# Altium schematic symbol library ILS_TETRA_LIB_S.SchLib: 4 symbols
Pins are listed as number, name and electrical type; pins without a type are passive.

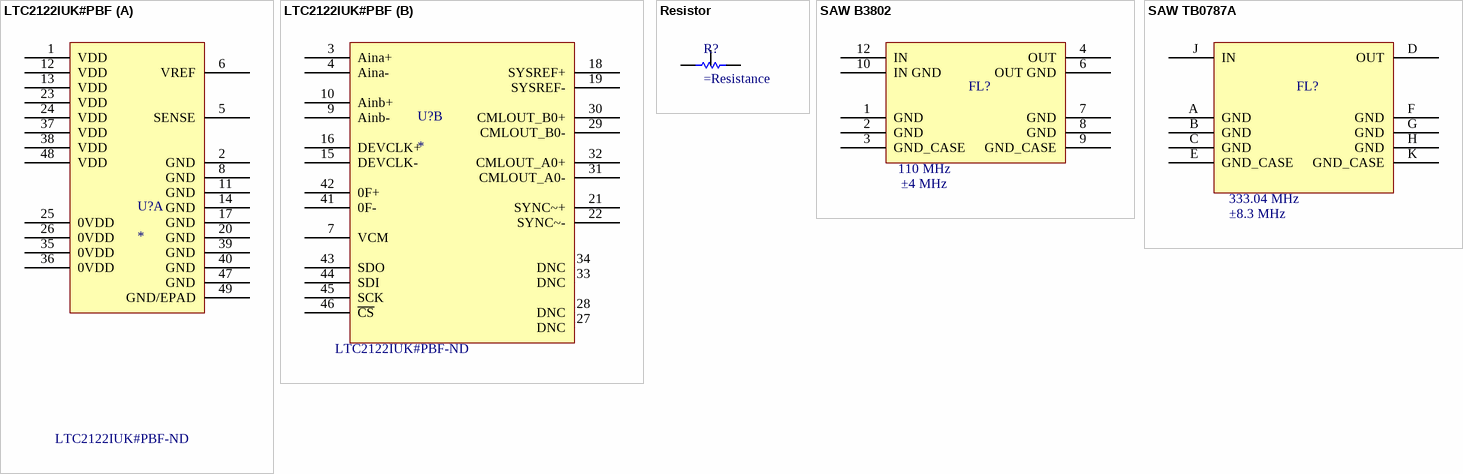
[diagram p0: symbols LTC2122IUK#PBF to SAW TB0787A]

## LTC2122IUK#PBF
designator U?  Supplier Part Number 1: LTC2122IUK#PBF-ND
IC ADC 14BIT 170MSPS 48QFN; Manufacturer: Analog Devices / Linear Technology; Manufacturer Part Number: LTC2122IUK#PBF; Number of Bits: 14; Sampling Rate: 170000000S/s; Number of Inputs: 2; Min Supply Voltage: 1.7V; Max Supply Voltage: 1.9V; Interface: SPI; Resolution: 14b; Supplier 1: Digi-Key; RoHS: Yes; Category: Analog to Digital Converters (ADCs); Stock 1: 52; Pricing 1: 1=105,29000, 25=102,14040 (USD); Case/Package: QFN; Number of Pins: 48; Min Operating Temperature: -40°C; Max Operating Temperature: 85°C; Packaging: Tray; Number of A/D Converters: 2; REACH SVHC: No SVHC; ComponentLink1URL: http://www.linear.com/docs/45350?src-supplier=Digi-Key; ComponentLink1Description: http://www.linear.com/docs/45350?src-supplier=Digi-Key; ComponentLink2URL: http://www.farnell.com/datasheets/1968213.pdf?src-supplier=Element14; ComponentLink2Description: http://www.farnell.com/datasheets/1968213.pdf?src-supplier=Element14
footprint LTC2122 (LTC2122, QFN, 48-Leads, Body 7,00x7,00mm, Pitch 0,50mm, Thermal Pad 5,15x5,15mm, IPC Medium Density)
part A pins: 1 VDD, 2 GND, 5 SENSE, 6 VREF, 8 GND, 11 GND, 12 VDD, 13 VDD, 14 GND, 17 GND, 20 GND, 23 VDD, 24 VDD, 25 0VDD, 26 0VDD, 35 0VDD, 36 0VDD, 37 VDD, 38 VDD, 39 GND, 40 GND, 47 GND, 48 VDD, 49 GND/EPAD
part B pins: 3 Aina+, 4 Aina-, 7 VCM, 9 Ainb-, 10 Ainb+, 15 DEVCLK-, 16 DEVCLK+, 18 SYSREF+, 19 SYSREF-, 21 SYNC~+, 22 SYNC~-, 27 DNC, 28 DNC, 29 CMLOUT_B0-, 30 CMLOUT_B0+, 31 CMLOUT_A0-, 32 CMLOUT_A0+, 33 DNC, 34 DNC, 41 0F-, 42 0F+, 43 SDO, 44 SDI, 45 SCK, 46 ~{CS}

## Resistor
designator R?
footprint RES 0402/1005 RF - 3-PADS (Chip Resistor, 2-Leads, Body 1.0x0.5mm, IPC High Density)
pins: 1, 2, 3

## SAW B3802
designator FL?  Bandwidth: ±4 MHz  Center frequency: 110 MHz  (hidden comment: *)
Low-Loss Filter 110,0 MHz / TYPE: B3802 / Ordering Code: B39111-B3802-Z910; Source Power: 10 dBm; ComponentLink1Description: Datasheet; ComponentLink1URL: https://www.tvsat.com.pl/pdf/B/b39111-b3802_epc.pdf; ComponentLink2Description: Supplier; ComponentLink2URL: https://shop.tvsat.com.pl/pl/p/10szt-Filtr-SAW-110MHz-B39111-B3802-Z910-SMD-EPCOS/20206
footprint QCC12B (Ceramic package QCC12B)
pins: 1 GND, 2 GND, 3 GND_CASE, 4 OUT, 6 OUT GND, 7 GND, 8 GND, 9 GND_CASE, 10 IN GND, 12 IN

## SAW TB0787A
designator FL?  Bandwidth 1dB: ±8.3 MHz  Center frequency: 333.04 MHz  (hidden comment: *)
SAW Filter 333.04MHz / Model: TB0787A / Part No: MP02661; Source Power: 10 dBm; ComponentLink1Description: Datasheet; ComponentLink1URL: https://www.golledge.com/media/2286/mp02661.pdf
footprint TB0787A (TB0787A MP02661)
pins: A GND, B GND, C GND, D OUT, E GND_CASE, F GND, G GND, H GND, J IN, K GND_CASE